# Altium schematic symbol library UJ20-C-V-G-SMT-P16-TR.SchLib: 1 symbol
Pins are listed as number, name and electrical type; pins without a type are passive.

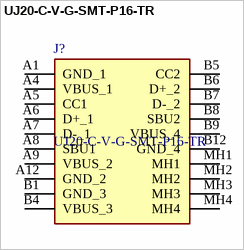
[diagram p0: symbol UJ20-C-V-G-SMT-P16-TR]

## UJ20-C-V-G-SMT-P16-TR
designator J?
Type C, USB 2.0, 480 Mbps, 30 Vdc, 5 A, Vertical, Surface Mount Anchor Pins Mounting Style, Surface Mount Contact Pin Type, Gold plated 3 in, Through Hole, 14 pin, USB Receptacle; Manufacturer_Name: Same Sky; Geometry.Height: 6.6mm; Mouser Part Number: 179-UJ20CVGSMTP16TR; Mouser Price/Stock: https://www.mouser.co.uk/ProductDetail/Same-Sky/UJ20-C-V-G-SMT-P16-TR?qs=IKkN%2F947nfCQ0EYlGKCaDg%3D%3D; Manufacturer_Part_Number: UJ20-C-V-G-SMT-P16-TR; Datasheet Link: https://www.sameskydevices.com/product/resource/uj20-c-v-g-smt-p16-tr.pdf
footprint UJ20CVGSMTP16TR
pins: A1 GND_1, A4 VBUS_1, A5 CC1, A6 D+_1, A7 D-_1, A8 SBU1, A9 VBUS_2, A12 GND_2, B1 GND_3, B4 VBUS_3, B5 CC2, B6 D+_2, B7 D-_2, B8 SBU2, B9 VBUS_4, B12 GND_4, MH1, MH2, MH3, MH4